# Altium footprint library FootPrintLib_12.PcbLib: 319 footprints (part 19 of 20)
Each footprint in its own frame and in the unit in brackets; x right, y up, seen from the top. Pads: shape width x height; smd on the part's side, far side on the other; paste and mask are expansions set on the pad; w line width, h text height; cw(c..) or ccw(c..) is an arc to the next point about the centre after c.
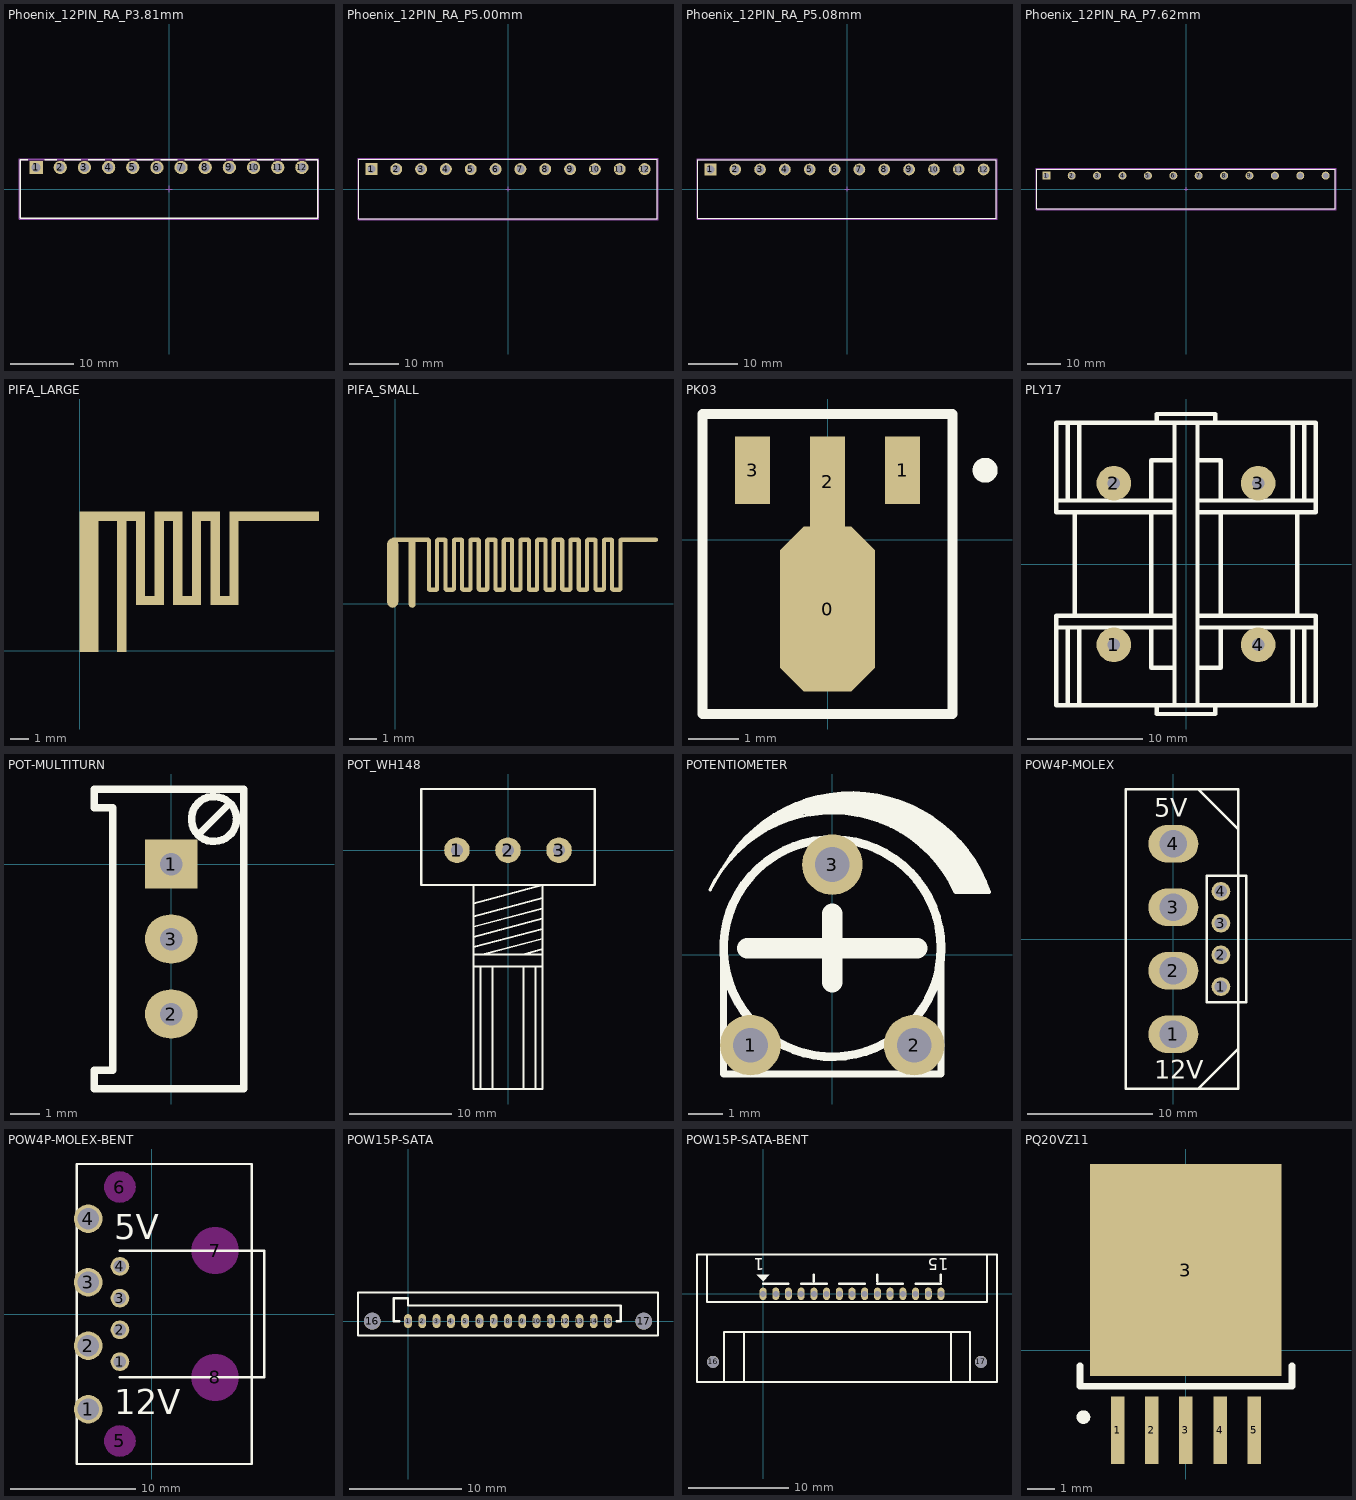
[diagram p18: the footprints below, top view; thin cyan lines are the x and y axes]

## Phoenix_12PIN_RA_P3.81mm [mm] "Phoenix 12 Pin; Pitch 3.81mm;"
height 7
pads (12):
  rect 2.1x2.1 hole 1.4: 1(-20.955,3.4)
  round 2.1 hole 1.4: 2(-17.145,3.4) 3(-13.335,3.4) 4(-9.525,3.4) 5(-5.715,3.4) 6(-1.905,3.4) 7(1.905,3.4) 8(5.715,3.4) 9(9.525,3.4) 10(13.335,3.4) 11(17.145,3.4) 12(20.955,3.4)
Top Overlay:
  lines w0.2: -22.305,4.6 -23.455,4.6 -23.455,-4.6 23.455,-4.6 23.455,4.6 21.545,4.6 ; -19.605,4.6 -17.735,4.6 ; -16.555,4.6 -13.925,4.6 ; -12.745,4.6 -10.115,4.6 ; -8.935,4.6 -6.305,4.6 ; -5.125,4.6 -2.495,4.6 ; -1.315,4.6 1.315,4.6 ; 2.495,4.6 5.125,4.6 ; 6.305,4.6 8.935,4.6 ; 10.115,4.6 12.745,4.6 ; 13.925,4.6 16.555,4.6 ; 17.735,4.6 20.365,4.6
Mechanical 13:
  lines w0.1: -23.455,-4.6 23.455,-4.6 23.455,4.6 -23.455,4.6 -23.455,-4.6
Mechanical 15:
  lines w0.05: -0.5,0 0.5,0 ; 0,-0.5 0,0.5 ; -23.655,-4.8 23.655,-4.8 23.655,4.8 -23.655,4.8 -23.655,-4.8
3D body "691322310012.stp": height 7.25, standoff -3.45, extent -23.455,-4.6 23.455,4.6

## Phoenix_12PIN_RA_P5.00mm [mm] "Phoenix 12 Pin; Pitch 5.08mm;"
height 8.5
pads (12):
  rect 2.4x2.4 hole 1.6: 1(-27.5,4)
  round 2.4 hole 1.6: 2(-22.5,4) 3(-17.5,4) 4(-12.5,4) 5(-7.5,4) 6(-2.5,4) 7(2.5,4) 8(7.5,4) 9(12.5,4) 10(17.5,4) 11(22.5,4) 12(27.5,4)
Top Overlay:
  lines w0.2: -30,-6 -30,6 30,6 30,-6 -30,-6
Mechanical 13:
  lines w0.1: -30,-6 30,-6 30,6 -30,6 -30,-6
Mechanical 15:
  lines w0.05: -0.5,0 0.5,0 ; 0,-0.5 0,0.5 ; -30.2,-6.2 -30.2,6.2 30.2,6.2 30.2,-6.2 -30.2,-6.2
3D body "691312710012.stp": height 8.55, standoff -3.45, extent -30,-6 30,6

## Phoenix_12PIN_RA_P5.08mm [mm] "Phoenix 12 Pin; Pitch 5.08mm; Body 6096X1200"
height 8.5
pads (12):
  rect 2.4x2.4 hole 1.6: 1(-27.94,4)
  round 2.4 hole 1.6: 2(-22.86,4) 3(-17.78,4) 4(-12.7,4) 5(-7.62,4) 6(-2.54,4) 7(2.54,4) 8(7.62,4) 9(12.7,4) 10(17.78,4) 11(22.86,4) 12(27.94,4)
Top Overlay:
  lines w0.2: -30.48,-6 30.48,-6 30.48,6 -30.48,6 -30.48,-6
Mechanical 13:
  lines w0.1: -30.48,-6 -30.48,6 30.48,6 30.48,-6 -30.48,-6
Mechanical 15:
  lines w0.05: -0.5,0 0.5,0 ; 0,-0.5 0,0.5 ; -30.68,-6.2 30.68,-6.2 30.68,6.2 -30.68,6.2 -30.68,-6.2
3D body "691312510012.stp": height 8.55, standoff -3.45, extent -30.48,-6 30.48,6

## Phoenix_12PIN_RA_P7.62mm [mm] "Phoenix 12 Pin; Pitch 7.62mm;"
height 8.5
pads (12):
  rect 2.4x2.4 hole 1.6: 1(-41.91,4)
  round 2.4 hole 1.6: 2(-34.29,4) 3(-26.67,4) 4(-19.05,4) 5(-11.43,4) 6(-3.81,4) 7(3.81,4) 8(11.43,4) 9(19.05,4) 10(26.67,4) 11(34.29,4) 12(41.91,4)
Top Overlay:
  lines w0.2: -44.81,-6 44.81,-6 44.81,6 -44.81,6 -44.81,-6
Mechanical 13:
  lines w0.1: -44.81,-6 -44.81,6 44.81,6 44.81,-6 -44.81,-6
Mechanical 15:
  lines w0.05: -0.5,0 0.5,0 ; 0,-0.5 0,0.5 ; -45.01,-6.2 -45.01,6.2 45.01,6.2 45.01,-6.2 -45.01,-6.2
3D body "691312410012.stp": height 8.55, standoff -3.95, extent -44.81,-6 44.81,6

## PIFA_LARGE [mm]
pads (15):
  rect 1x7.5 smd: ""(0.5,3.7)
  rect 3x0.5 smd: ""(2,7.2)
  rect 0.5x7 smd: ""(2.25,3.45)
  rect 0.5x5 smd: ""(3.25,4.95) ""(4.25,4.95) ""(5.25,4.95) ""(6.25,4.95) ""(7.25,4.95) ""(8.25,4.95)
  rect 1x0.5 smd: ""(3.75,2.7) ""(4.75,7.2) ""(5.75,2.7) ""(6.75,7.2) ""(7.75,2.7)
  rect 4.3x0.5 smd: ""(10.65,7.2)

## PIFA_SMALL [mm]
pads (51):
  oval 0.4x2.5 smd: ""(-0.1,1.1)
  oval 1.4x0.15 smd: ""(0.55,2.3) ""(8.75,2.3)
  oval 0.25x2.5 smd: ""(0.6,1.1)
  oval 0.15x1.9 smd: ""(1.2,1.4) ""(1.5,1.4) ""(1.8,1.4) ""(2.1,1.4) ""(2.4,1.4) ""(2.7,1.4) ""(3,1.4) ""(3.3,1.4) ""(3.6,1.4) ""(3.9,1.4) ""(4.2,1.4) ""(4.5,1.4) ""(4.8,1.4) ""(5.1,1.4) ""(5.4,1.4) ""(5.7,1.4) ""(6,1.4) ""(6.3,1.4) ""(6.6,1.4) ""(6.9,1.4) ""(7.2,1.4) ""(7.5,1.4) ""(7.8,1.4) ""(8.1,1.4)
  oval 0.4x0.15 smd: ""(1.35,0.5) ""(1.65,2.3) ""(1.95,0.5) ""(2.25,2.3) ""(2.55,0.5) ""(2.85,2.3) ""(3.15,0.5) ""(3.45,2.3) ""(3.75,0.5) ""(4.05,2.3) ""(4.35,0.5) ""(4.65,2.3) ""(4.95,0.5) ""(5.25,2.3) ""(5.55,0.5) ""(5.85,2.3) ""(6.15,0.5) ""(6.45,2.3) ""(6.75,0.5) ""(7.05,2.3) ""(7.35,0.5) ""(7.65,2.3) ""(7.95,0.5)

## PK03 [mm] "SOT-89; Body 4.6 x 4.25 mm, inc. leads (LxW max)"
height 1.6
pads (4):
  oct 1.9x3.3 smd: 0(0,-1.388)
  rect 0.7x1.35 smd: 1(1.5,1.388) 3(-1.5,1.388)
  rect 0.7x1.8 smd: 2(0,1.162)
Top Overlay:
  circle w0.25: c3.15,1.388 r0.125
  lines w0.2: -2.5,-3.487 2.5,-3.487 2.5,2.512 -2.5,2.512 -2.5,-3.487

## PLY17 [mm] "EMI Suppression Filter (EMIFIL) for AC Power Lines"
height 12.5
pads (4):
  round 3 hole 1.1: 1(-6.25,-7) 2(-6.25,7) 3(6.25,7) 4(6.25,-7)
Top Overlay:
  lines w0.381: -11.25,-5.5 -1,-5.5 ; -11.25,5.5 -1,5.5 ; -10.25,-12.25 -10.25,-5.5 ; -10.25,5.5 -10.25,12.25 ; -9.652,-4.5 -9.652,4.5 ; -9.25,-12.25 -9.25,-5.5 ; -9.25,5.5 -9.25,12.25 ; -3,-5.5 -3,-9 -1,-9 ; -3,-4.5 -3,4.5 ; -3,5.5 -3,9 -1,9 ; -2.54,-12.25 -2.54,-13 2.54,-13 2.54,-12.25 ; -2.54,12.25 -2.54,13 2.54,13 2.54,12.25 ; -1,-12.25 -1,12.25 ; -1,-4.5 -11.25,-4.5 -11.25,-12.25 11.25,-12.25 11.25,-4.5 1,-4.5 ; -1,4.5 -11.25,4.5 -11.25,12.25 11.25,12.25 11.25,4.5 1,4.5 ; 1,-12.25 1,12.25 ; 1,-9 3,-9 3,-5.5 ; 1,-5.5 11.25,-5.5 ; 1,5.5 11.25,5.5 ; 1,9 3,9 3,5.5 ; 3,-4.5 3,4.5 ; 9.25,-12.25 9.25,-5.5 ; 9.25,5.5 9.25,12.25 ; 9.652,-4.5 9.652,4.5 ; 10.25,-12.25 10.25,-5.5 ; 10.25,5.5 10.25,12.25

## POT-MULTITURN [mil] "multi turn potentiometer"
pads (3):
  rect 70x65 hole 30: 1(0,0)
  oval 70x65 hole 30: 2(0,-200) 3(0,-100)
Top Overlay:
  circle w10: c57,60 r30
  lines w10: 37,40 77,80 ; -103,-300 97,-300 97,100 -103,100 -103,75 -78,75 -78,-275 -103,-275 -103,-300
3D body "multiturn.STEP": height 452.18, standoff -75.38, extent -73.23,-285.04 92.52,88.98

## POT_WH148 [mm] "Chip Variable Resistor, 3-Leads, Body 5x5x5mm"
height 21
pads (3):
  round 2.5 hole 1.2: 1(-5,0) 2(0,0) 3(5,0)
Top Overlay:
  lines w0.2: -3.4,-11.4 3.4,-11.4 ; -3.4,-10.2 3.4,-10.2 ; -3.4,-9.5 3.4,-7.7 ; -3.4,-8.5 3.4,-6.7 ; -3.4,-7.5 3.4,-5.7 ; -3.4,-6.5 3.4,-4.7 ; -3.4,-5.2 3.4,-3.4 3.4,-23.4 -3.4,-23.4 -3.4,-3.4 ; -2.7,-23.4 -2.7,-11.4 ; -2.298,-10.183 3.4,-8.675 ; -1.5,-23.4 -1.5,-11.4 ; 1.5,-23.4 1.5,-11.4 ; 1.501,-10.203 3.4,-9.7 ; 2.7,-23.4 2.7,-11.4 ; -8.5,-3.4 -8.5,6 8.5,6 8.5,-3.4 -8.5,-3.4
3D body "Potenciometro PCI 10K.STEP": height 21.5, standoff -4.23, extent -8.5,-23.55 8.5,6.25

## POTENTIOMETER [mil]
height 185.04
pads (3):
  round 70 hole 40: 1(-94.49,-104.33) 2(94.49,-104.33) 3(0,104.33)
Top Overlay:
  circle w10: c0,7.87 r125.59
  lines w3.94: -141.04,75.24 cw(c0,7.87) 142.47,72.16 180.95,72.15 ; -124.67,102.67 cw(c21.51,18.33) 181.5,72.05 ; -108.27,123.33 -97.64,133.07 ; -100.39,133.86 -94.88,133.86 ; -97.64,136.61 -90.16,136.61 ; -94.49,140.16 -85.04,140.16 ; -90.94,143.7 -79.13,143.7 ; -85.83,147.24 -72.05,147.24 ; -82.28,150.79 -64.17,150.79 ; -77.17,154.33 -56.69,154.33 ; -73.62,157.48 -46.06,157.48 ; -67.72,161.02 -34.25,161.02 ; -62.6,164.57 104.22,164.57 ; -55.51,168.11 97.93,168.11 ; -49.21,171.26 91.23,171.65 ; -42.13,174.41 84.15,174.8 ; -33.07,177.95 75.48,177.95 ; -20.47,181.5 61.7,181.5 ; -6.69,183.86 48.71,183.86 ; 31.89,161.02 110.13,161.02 ; 45.67,157.48 115.64,157.48 ; 55.51,153.94 120.37,153.94 ; 64.96,150.39 125.09,150.39 ; 72.44,146.85 129.42,146.85 ; 84.25,139.76 136.9,139.76 ; 90.55,136.22 140.84,136.22 ; 100,129.13 146.35,129.13 ; 108.66,122.44 152.65,122.44 ; 115.35,114.96 156.19,114.96 ; 120.08,112.2 158.56,112.2 ; 121.65,109.45 160.13,109.45 ; 124.02,106.69 162.49,106.69 ; 126.38,103.54 164.85,103.54 ; 130.71,96.06 169.19,96.06 ; 133.46,92.52 171.94,92.52 ; 134.65,88.98 173.12,88.98 ; 136.61,85.43 175.09,85.43 ; 137.8,82.28 176.27,82.28 ; 139.76,78.74 178.24,78.74 ; 140.94,75.59 179.42,75.59
  lines w4.72: 78.74,143.31 134.15,143.31 ; 95.28,132.68 143.99,132.68 ; 105.51,125.98 149.5,125.98 ; 111.02,118.9 155.01,118.9
  lines w5.91: 128.35,100 166.82,100
  lines w7.87: -125.59,15.75 -125.59,-137.8 125.59,-137.8 125.59,15.75
  lines w23.62: -98.43,7.87 98.43,7.87 ; 0,-31.5 0,47.24
3D body "pot.STEP": height 183.07, standoff -62.99, extent -124.8,-144.09 127.1,145.24

## POW4P-MOLEX [mm] "4P power connector for hard drive or floppy"
pads (8):
  oval 4x3 hole 2.2: 1(0,-7.62) 2(0,-2.54) 3(0,2.54) 4(0,7.62)
  round 1.5 hole 1: 1(3.81,-3.81) 2(3.81,-1.27) 3(3.81,1.27) 4(3.81,3.81)
Top Overlay:
  lines w0.2: 1.968,-12.002 5.143,-8.826 ; 1.968,12.002 5.207,8.763 ; 5.08,-5.08 5.842,-5.08 5.842,5.08 5.08,5.08 ; 5.207,-5.08 2.667,-5.08 2.667,5.08 5.207,5.08 ; 5.207,-5.08 5.207,5.08 ; 5.207,-5.08 5.207,-12 -3.81,-12 -3.81,12 5.207,12 5.207,5.08
  text "5V" at -1.524,9.779 h1.5
  text "12V" at -1.524,-11.176 h1.5
3D body "User Library-Molex disk drive power connector.step": height 12.19, standoff 0, extent -3.683,-11.684 5.207,11.684

## POW4P-MOLEX-BENT [mm] "4P power connector for hard drive or floppy"
pads (12):
  round 2.3 hole 1.7: 1(-5.08,-7.62) 2(-5.08,-2.54) 3(-5.08,2.54) 4(-5.08,7.62)
  round 1.5 hole 1: 1(-2.54,-3.81) 2(-2.54,-1.27) 3(-2.54,1.27) 4(-2.54,3.81)
  round 2.54 on Keep-Out: 5(-2.54,-10.16) 6(-2.54,10.16)
  round 3.8 on Keep-Out: 7(5.08,5.08) 8(5.08,-5.08)
Top Overlay:
  lines w0.2: -2.54,-5.08 9,-5.08 9,5.08 -2.54,5.08 ; -6,-12 -6,12 8,12 8,-12 -6,-12
  text "5V" at -3,6 h2
  text "12V" at -3,-8 h2
3D body "User Library-Molex disk drive power connector.step": height 8.79, standoff -0.1, extent -5.08,-11.684 7.112,11.684

## POW15P-SATA [mm] "15P power connector for serial ata interface"
pads (17):
  oval 0.7x1.25 hole 0.6: 1(0,0) 2(1.27,0) 3(2.54,0) 4(3.81,0) 5(5.08,0) 6(6.35,0) 7(7.62,0) 8(8.89,0) 9(10.16,0) 10(11.43,0) 11(12.7,0) 12(13.97,0) 13(15.24,0) 14(16.51,0) 15(17.78,0)
  round 1.5 hole 1.5: 16(-3.175,0) 17(20.955,0)
Top Overlay:
  lines w0.2: -0.762,0 -1.27,0 -1.27,2.032 0,2.032 0,1.397 18.923,1.397 18.923,0 18.542,0 ; -4.445,-1.27 -4.445,2.54 22.225,2.54 22.225,-1.27 -4.445,-1.27

## POW15P-SATA-BENT [mm] "15P power connector for serial ata interface"
pads (17):
  oval 0.7x1.25 hole 0.6: 1(0,0) 2(1.27,0) 3(2.54,0) 4(3.81,0) 5(5.08,0) 6(6.35,0) 7(7.62,0) 8(8.89,0) 9(10.16,0) 10(11.43,0) 11(12.7,0) 12(13.97,0) 13(15.24,0) 14(16.51,0) 15(17.78,0)
  round 1.2 hole 1.2: 16(-5,-6.8) 17(21.78,-6.8)
Top Overlay:
  region: 0,1.27 -0.635,1.905 0.635,1.905
  lines w0.2: -5.6,3.9 -5.6,-0.8 22.28,-0.8 ; -3.9,-8.8 -3.9,-3.8 20.68,-3.8 20.68,-8.8 ; -1.9,-8.8 -1.9,-3.8 ; 18.78,-8.8 18.78,-3.8 ; 22.38,-0.8 22.38,3.9 ; -6.6,-8.8 -6.6,3.9 23.38,3.9 23.38,-8.8 -6.6,-8.8
  lines w0.254: 0,1.016 2.54,1.016 ; 3.81,1.016 6.35,1.016 ; 5.08,1.27 5.08,1.905 ; 7.62,1.016 10.16,1.016 ; 11.43,1.016 13.97,1.016 ; 11.43,1.27 11.43,1.905 ; 15.24,1.016 17.78,1.016 ; 17.78,1.27 17.78,1.905
  text "15" at 18.542,3.556 h1.2
  text "1" at 0.127,3.556 h1.2

## PQ20VZ11 [mm]
height 20
pads (6):
  rect 0.5x2.5 smd: 1(-2.54,-2.976) 2(-1.27,-2.976) 3(0,-2.976) 4(1.27,-2.976) 5(2.54,-2.976)
  rect 7.112x7.874 smd: 3(0,2.976)
Top Overlay:
  circle w0.254: c-3.808,-2.485 r0.127
  lines w0.254: -3.935,-0.58 -3.935,-1.342 3.939,-1.342 3.939,-0.58
3D body "PPAK.STEP": height 2.3, standoff 0, extent -3.248,-3.585 3.252,6.315